# Altium schematic symbol library WMK36N65C4.SchLib: 1 symbol
Pins are listed as number, name and electrical type; pins without a type are passive.

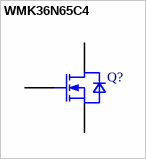
[diagram p0: symbol WMK36N65C4]

## WMK36N65C4
designator Q?  (value not drawn)
Transistor: N-MOSFET; WMOS™ C4; unipolar; 650V; 20A; Idm: 100A; 277W; Manufacturer: WAYON; ManufacturerPartNumber: WMK36N65C4; PackageReference: PG-TO220
footprint TO220-3 (TO220-3-Leads, Body 10.03 X 4.435mm,Pitch 2.54mm)
pins: 1 GATE, 2 DRAIN, 3 SOURCE